# Altium footprint library 加热模块V2.4.PcbLib: 33 footprints (part 1 of 3)
Each footprint in its own frame and in the unit in brackets; x right, y up, seen from the top. Pads: shape width x height; smd on the part's side, far side on the other; paste and mask are expansions set on the pad; w line width, h text height; cw(c..) or ccw(c..) is an arc to the next point about the centre after c.
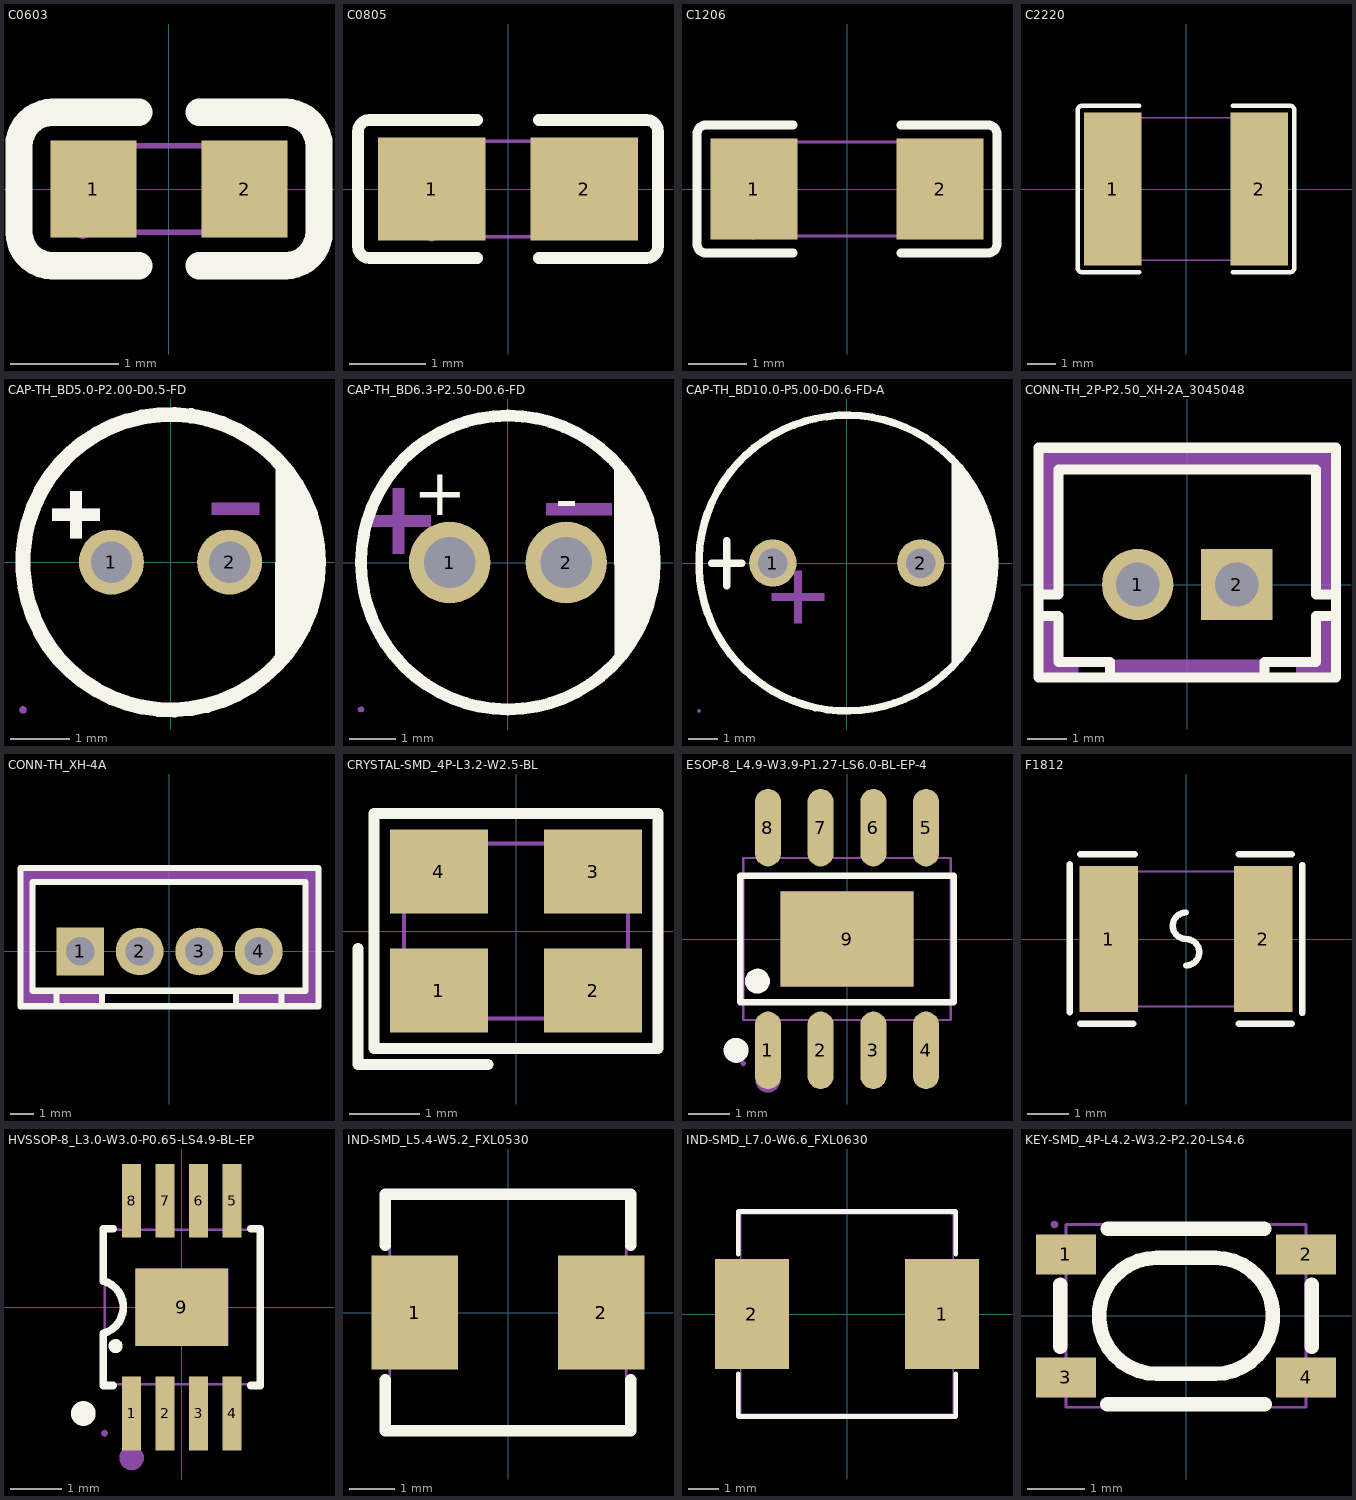
[diagram p0: the footprints below, top view; thin cyan lines are the x and y axes]

## C0603 [mm]
pads (2):
  rect 0.8x0.9 smd: 1(-0.7,0) 2(0.7,0)
Top Overlay:
  lines w0.254: -1.08,-0.71 -0.28,-0.71 ; -1.08,0.71 -0.28,0.71 ; -1.08,-0.71 cw(c-1.08,-0.4) -1.39,-0.4 -1.39,0.4 cw(c-1.08,0.4) -1.08,0.71 ; 0.28,-0.71 1.08,-0.71 ccw(c1.08,-0.4) 1.39,-0.4 1.39,0.4 ccw(c1.08,0.4) 1.08,0.71 0.28,0.71
Mechanical 15:
  region: -0.8,-0.4 -0.8,0.4 -0.5,0.4 -0.5,-0.4
  region: 0.8,-0.4 0.8,0.4 0.5,0.4 0.5,-0.4
  region: -0.865,-0.4 -0.846,-0.354 -0.8,-0.335 -0.754,-0.354 -0.735,-0.4 -0.754,-0.446 -0.8,-0.465 -0.846,-0.446
  lines w0.051: -0.8,-0.4 -0.8,0.4 0.8,0.4 0.8,-0.4 -0.8,-0.4

## C0805 [mm]
pads (2):
  rect 1.41x1.35 smd paste-100 mask+0.051: 1(-1,0) 2(1,0)
Top Overlay:
  lines w0.152: -0.401,-0.904 -1.811,-0.904 cw(c-1.811,-0.751) -1.964,-0.751 -1.964,0.751 cw(c-1.811,0.751) -1.811,0.904 -0.401,0.904 ; 0.401,-0.904 1.811,-0.904 ccw(c1.811,-0.751) 1.964,-0.751 1.964,0.751 ccw(c1.811,0.751) 1.811,0.904 0.401,0.904
Top Paste:
  region: 1.705,0.64 1.705,-0.64 1.655,-0.69 0.505,-0.69 0.455,-0.64 0.45,-0.23 0.9,-0.23 0.9,0.22 0.46,0.22 0.455,0.64 0.505,0.69 1.655,0.69
  region: -1.705,-0.64 -1.705,0.64 -1.655,0.69 -0.505,0.69 -0.455,0.64 -0.45,0.23 -0.9,0.23 -0.9,-0.22 -0.46,-0.22 -0.455,-0.64 -0.505,-0.69 -1.655,-0.69
Mechanical 15:
  region: 1,0.625 1,-0.625 0.5,-0.625 0.5,0.625
  region: -1,-0.625 -1,0.625 -0.5,0.625 -0.5,-0.625
  region: -1,-0.69 -1.046,-0.671 -1.065,-0.625 -1.046,-0.579 -1,-0.56 -0.954,-0.579 -0.935,-0.625 -0.954,-0.671
  lines w0.051: -1,-0.625 1,-0.625 1,0.625 -1,0.625 -1,-0.625

## C1206 [mm]
pads (2):
  rect 1.485x1.728 smd paste-100 mask+0.051: 1(-1.593,0) 2(1.593,0)
Top Overlay:
  lines w0.152: -0.926,-1.093 -2.411,-1.093 cw(c-2.411,-0.94) -2.564,-0.94 -2.564,0.94 cw(c-2.411,0.94) -2.411,1.093 -0.926,1.093 ; 0.926,-1.093 2.411,-1.093 ccw(c2.411,-0.94) 2.564,-0.94 2.564,0.94 ccw(c2.411,0.94) 2.411,1.093 0.926,1.093
Top Paste:
  region: -0.85,-0.764 -0.85,-0.394 -0.95,-0.294 -1.255,-0.294 -1.355,-0.194 -1.355,0.194 -1.255,0.294 -0.95,0.294 -0.85,0.394 -0.85,0.764 -0.95,0.864 -2.235,0.864 -2.335,0.764 -2.335,-0.764 -2.235,-0.864 -0.95,-0.864
  region: 0.85,-0.764 0.85,-0.394 0.95,-0.294 1.255,-0.294 1.355,-0.194 1.355,0.194 1.255,0.294 0.95,0.294 0.85,0.394 0.85,0.764 0.95,0.864 2.235,0.864 2.335,0.764 2.335,-0.764 2.235,-0.864 0.95,-0.864
Mechanical 15:
  region: 1.6,-0.8 1.6,0.8 1.1,0.8 1.1,-0.8
  region: -1.6,-0.8 -1.6,0.8 -1.1,0.8 -1.1,-0.8
  region: -1.665,-0.8 -1.646,-0.754 -1.6,-0.735 -1.554,-0.754 -1.535,-0.8 -1.554,-0.846 -1.6,-0.865 -1.646,-0.846
  lines w0.051: -1.6,-0.8 1.6,-0.8 1.6,0.8 -1.6,0.8 -1.6,-0.8

## C2220 [mm]
pads (2):
  rect 2.01x5.4 smd paste-100 mask+0.051: 1(-2.58,0) 2(2.58,0)
Top Overlay:
  lines w0.152: -1.651,-2.929 -3.661,-2.929 cw(c-3.661,-2.776) -3.814,-2.776 -3.814,2.776 cw(c-3.661,2.776) -3.661,2.929 -1.651,2.929 ; 1.651,-2.929 3.661,-2.929 ccw(c3.661,-2.776) 3.814,-2.776 3.814,2.776 ccw(c3.661,2.776) 3.661,2.929 1.651,2.929
Top Paste:
  region: -1.575,-2.6 -1.575,-1.018 -1.675,-0.918 -2.158,-0.918 -2.258,-0.818 -2.258,0.818 -2.158,0.918 -1.675,0.918 -1.575,1.018 -1.575,2.6 -1.675,2.7 -3.485,2.7 -3.585,2.6 -3.585,-2.6 -3.485,-2.7 -1.675,-2.7
  region: 1.575,-2.6 1.575,-1.018 1.675,-0.918 2.158,-0.918 2.258,-0.818 2.258,0.818 2.158,0.918 1.675,0.918 1.575,1.018 1.575,2.6 1.675,2.7 3.485,2.7 3.585,2.6 3.585,-2.6 3.485,-2.7 1.675,-2.7
Mechanical 15:
  region: 2.85,-2.5 2.85,2.5 2,2.5 2,-2.5
  region: -2.85,-2.5 -2.85,2.5 -2,2.5 -2,-2.5
  region: -2.85,-2.565 -2.896,-2.546 -2.915,-2.5 -2.896,-2.454 -2.85,-2.435 -2.804,-2.454 -2.785,-2.5 -2.804,-2.546
  lines w0.051: -2.85,-2.5 2.85,-2.5 2.85,2.5 -2.85,2.5 -2.85,-2.5

## CAP-TH_BD5.0-P2.00-D0.5-FD [mm]
pads (2):
  round 1.1 hole 0.7 paste+0 mask+0.05: 1(-1,0) 2(1,0)
Top Overlay:
  circle w0.254: c0,0 r2.5
  region: -1.7,1.2 -1.5,1.2 -1.5,0.4 -1.7,0.4
  region: -1.2,0.9 -1.2,0.7 -2,0.7 -2,0.9
  region: 1.776,1.776 2.089,1.396 2.321,0.961 2.464,0.49 2.512,0 2.464,-0.49 2.321,-0.961 2.089,-1.396 1.776,-1.776 1.768,-1.768
Mechanical 6:
  region: 1.5,1 1.5,0.8 0.7,0.8 0.7,1
  region: -1.7,1.2 -1.5,1.2 -1.5,0.4 -1.7,0.4
  region: -1.2,0.9 -1.2,0.7 -2,0.7 -2,0.9
Mechanical 15:
  region: -1,-0.255 -1.098,-0.235 -1.18,-0.18 -1.235,-0.098 -1.255,0 -1.235,0.098 -1.18,0.18 -1.098,0.235 -1,0.255 -0.902,0.235 -0.82,0.18 -0.765,0.098 -0.745,0 -0.765,-0.098 -0.82,-0.18 -0.902,-0.235
  region: 1,-0.255 0.902,-0.235 0.82,-0.18 0.765,-0.098 0.745,0 0.765,0.098 0.82,0.18 0.902,0.235 1,0.255 1.098,0.235 1.18,0.18 1.235,0.098 1.255,0 1.235,-0.098 1.18,-0.18 1.098,-0.235
  region: -2.5,-2.565 -2.546,-2.546 -2.565,-2.5 -2.546,-2.454 -2.5,-2.435 -2.454,-2.454 -2.435,-2.5 -2.454,-2.546
  lines w0.051: -2.5,0 cw(c0,0) 0,2.5 cw(c0,0) 2.5,0 cw(c0,0) 0,-2.5 cw(c0,0) -2.5,0

## CAP-TH_BD6.3-P2.50-D0.6-FD [mm]
pads (2):
  round 1.75 hole 1.1 paste+0 mask+0.05: 1(-1.25,0) 2(1.25,0)
Top Overlay:
  circle w0.254: c0,0 r3.15
  region: 2.286,-2.286 2.285,2.17 2.293,2.176 2.615,1.799 2.874,1.376 3.064,0.918 3.179,0.436 3.218,-0.059 3.209,-0.059 3.218,-0.059 3.179,-0.553 3.064,-1.035 2.874,-1.493 2.615,-1.916 2.293,-2.293
  lines w0.254: -3.15,0 ccw(c0,0) 3.15,0 ccw(c0,0) -3.15,0
  text "-" at 1.016,0.889 h1
  text "+" at -2.032,1.016 h1
Mechanical 6:
  region: 0.826,1.27 2.222,1.27 2.222,1.016 0.826,1.016
  region: -2.476,0.191 -2.476,1.587 -2.222,1.587 -2.222,0.191
  region: -3.048,1.016 -1.651,1.016 -1.651,0.762 -3.048,0.762
Mechanical 15:
  region: 0.944,0 0.967,0.117 1.034,0.216 1.133,0.283 1.25,0.306 1.367,0.283 1.466,0.216 1.533,0.117 1.556,0 1.533,-0.117 1.466,-0.216 1.367,-0.283 1.25,-0.306 1.133,-0.283 1.034,-0.216 0.967,-0.117
  region: -1.556,0 -1.533,0.117 -1.466,0.216 -1.367,0.283 -1.25,0.306 -1.133,0.283 -1.034,0.216 -0.967,0.117 -0.944,0 -0.967,-0.117 -1.034,-0.216 -1.133,-0.283 -1.25,-0.306 -1.367,-0.283 -1.466,-0.216 -1.533,-0.117
  region: -3.217,-3.151 -3.198,-3.105 -3.152,-3.086 -3.106,-3.105 -3.087,-3.151 -3.106,-3.197 -3.152,-3.216 -3.198,-3.197
  lines w0.051: -3.152,-0.001 ccw(c-0.002,-0.001) -0.002,-3.151 0.001,-3.151 ccw(c0.001,-0.005) 3.147,-0.005 3.147,0.005 ccw(c0,0.005) 0,3.152 -0.003,3.152 ccw(c-0.003,0.003) -3.152,0.003 -3.152,-0.001

## CAP-TH_BD10.0-P5.00-D0.6-FD-A [mm]
pads (2):
  round 1.6 hole 1: 1(-2.5,0) 2(2.5,0)
Top Overlay:
  circle w0.254: c0,0 r5
  region: 3.556,3.556 3.556,-3.556 4.318,-2.54 4.826,-1.016 5.08,0.508 4.826,1.524
  lines w0.254: -4.572,0 -3.556,0 ; -4.064,-0.762 -4.064,0.762
Mechanical 6:
  region: -1.778,-2.032 -1.524,-2.032 -1.524,-0.254 -1.778,-0.254
  region: -2.54,-1.016 -0.762,-1.016 -0.762,-1.27 -2.54,-1.27
Mechanical 15:
  region: 2.5,-0.306 2.383,-0.283 2.284,-0.216 2.217,-0.117 2.194,0 2.217,0.117 2.284,0.216 2.383,0.283 2.5,0.306 2.617,0.283 2.716,0.216 2.783,0.117 2.806,0 2.783,-0.117 2.716,-0.216 2.617,-0.283
  region: -2.5,-0.306 -2.617,-0.283 -2.716,-0.216 -2.783,-0.117 -2.806,0 -2.783,0.117 -2.716,0.216 -2.617,0.283 -2.5,0.306 -2.383,0.283 -2.284,0.216 -2.217,0.117 -2.194,0 -2.217,-0.117 -2.284,-0.216 -2.383,-0.283
  region: -5,-5.065 -5.046,-5.046 -5.065,-5 -5.046,-4.954 -5,-4.935 -4.954,-4.954 -4.935,-5 -4.954,-5.046
  lines w0.051: -5,0 ccw(c0,0) 5,0 ccw(c0,0) -5,0

## CONN-TH_2P-P2.50_XH-2A_3045048 [mm]
pads (2):
  round 1.8 hole 1.1 paste+0 mask+0.05: 1(-1.25,0)
  rect 1.8x1.8 hole 1.1 paste+0 mask+0.05: 2(1.25,0)
Top Overlay:
  lines w0.254: -3.75,-0.249 -3.25,-0.249 -3.25,2.9 3.25,2.9 3.25,-0.25 3.75,-0.25 ; -3.749,-0.798 -3.249,-0.798 -3.249,-1.951 -2.751,-1.951 -1.951,-1.951 -1.951,-2.349 -2.751,-2.349 ; 2.75,-2.35 1.95,-2.35 1.95,-1.951 2.75,-1.951 3.248,-1.951 3.248,-0.798 3.749,-0.798 ; -3.75,-2.35 3.75,-2.35 3.75,3.45 -3.75,3.45 -3.75,-2.35
Mechanical 6:
  region: -3.249,-0.25 -3.75,-0.25 -3.75,3.45 3.75,3.45 3.75,-0.25 3.25,-0.25 3.25,2.917 -3.249,2.917
  region: 2.75,-1.9 3.242,-1.9 3.25,-1.908 3.25,-0.75 3.751,-0.75 3.751,-2.35 3.75,-2.35 2.751,-2.35 2.75,-2.349
  region: -1.9,-2.4 -1.9,-1.9 1.901,-1.9 1.9,-2.4
  region: -2.749,-1.95 -3.241,-1.95 -3.249,-1.958 -3.249,-0.8 -3.75,-0.8 -3.75,-2.4 -2.751,-2.4 -2.749,-2.399
Mechanical 15:
  region: -1.57,0.32 -0.93,0.32 -0.93,-0.32 -1.57,-0.32
  region: 0.93,0.32 1.57,0.32 1.57,-0.32 0.93,-0.32
  region: -3.685,-2.35 -3.704,-2.396 -3.75,-2.415 -3.796,-2.396 -3.815,-2.35 -3.796,-2.304 -3.75,-2.285 -3.704,-2.304
  lines w0.051: -3.75,-2.35 3.75,-2.35 3.75,3.45 -3.75,3.45 -3.75,-2.35

## CONN-TH_XH-4A [mm]
pads (4):
  rect 2x2 hole 1.2: 1(-3.75,0)
  round 2 hole 1.2: 2(-1.25,0) 3(1.25,0) 4(3.75,0)
Top Overlay:
  lines w0.254: 6.25,-2.3 -6.25,-2.3 -6.25,3.5 6.25,3.5 6.25,-2.286 ; -5.748,-1.651 -5.748,2.921 5.715,2.921 5.715,-1.651 -5.748,-1.651 ; -4.732,-2.286 -4.732,-1.651 -2.827,-1.651 -2.827,-2.286 -4.732,-2.286 ; 2.794,-2.286 2.794,-1.651 4.699,-1.651 4.699,-2.286 2.794,-2.286
Mechanical 6:
  region: 2.85,-1.67 5.66,-1.67 5.66,2.9 -5.67,2.9 -5.69,2.88 -5.69,-1.64 -5.71,-1.66 -2.86,-1.66 -2.85,-1.67 -2.85,-2.35 -6.16,-2.35 -6.24,-2.27 -6.24,3.5 6.26,3.5 6.26,-2.31 6.28,-2.33 2.85,-2.33
Mechanical 15:
  region: -4.075,0.325 -3.425,0.325 -3.425,-0.325 -4.075,-0.325
  region: -1.575,0.325 -0.925,0.325 -0.925,-0.325 -1.575,-0.325
  region: 0.925,0.325 1.575,0.325 1.575,-0.325 0.925,-0.325
  region: 3.425,0.325 4.075,0.325 4.075,-0.325 3.425,-0.325
  region: -6.315,-2.39 -6.296,-2.344 -6.25,-2.325 -6.204,-2.344 -6.185,-2.39 -6.204,-2.436 -6.25,-2.455 -6.296,-2.436
  lines w0.051: -6.25,-2.39 -6.25,3.41 6.25,3.41 6.25,-2.39 -6.25,-2.39

## CRYSTAL-SMD_4P-L3.2-W2.5-BL [mm]
pads (4):
  rect 1.4x1.2 smd: 1(-1.1,-0.85) 2(1.1,-0.85) 3(1.1,0.85) 4(-1.1,0.85)
Top Overlay:
  lines w0.152: -2.257,-0.25 -2.257,-1.907 -0.4,-1.907 ; -2.029,-1.678 2.029,-1.678 2.029,1.679 -2.029,1.679 -2.029,-1.678
Mechanical 6:
  circle w0.254: c-1.27,-0.889 r0.127
Mechanical 15:
  region: -1.5,-0.35 -0.6,-0.35 -0.6,-1.15 -1.5,-1.15
  region: 0.6,-0.35 1.5,-0.35 1.5,-1.15 0.6,-1.15
  region: 0.6,1.15 1.5,1.15 1.5,0.35 0.6,0.35
  region: -1.5,1.15 -0.6,1.15 -0.6,0.35 -1.5,0.35
  region: -1.535,-1.25 -1.554,-1.204 -1.6,-1.185 -1.646,-1.204 -1.665,-1.25 -1.646,-1.296 -1.6,-1.315 -1.554,-1.296
  lines w0.051: -1.6,-1.25 1.6,-1.25 1.6,1.25 -1.6,1.25 -1.6,-1.25

## ESOP-8_L4.9-W3.9-P1.27-LS6.0-BL-EP-4 [mm]
pads (9):
  oval 0.63x1.865 smd: 1(-1.905,-2.682) 2(-0.635,-2.682) 3(0.635,-2.682) 4(1.905,-2.682) 5(1.905,2.682) 6(0.635,2.682) 7(-0.635,2.682) 8(-1.905,2.682)
  rect 3.2x2.3 smd paste+0 mask+0.05: 9(0,0)
Top Overlay:
  circle w0.3: c-2.672,-2.682 r0.15
  circle w0.3: c-2.159,-1.016 r0.15
  lines w0.152: -2.576,-1.521 2.576,-1.521 2.576,1.521 -2.576,1.521 -2.576,-1.521
Mechanical 6:
  circle w0.3: c-1.905,-3.4 r0.15
Mechanical 15:
  region: -1.6,1.15 1.6,1.15 1.6,-1.15 -1.6,-1.15
  region: -2.115,-3 -2.115,-2.165 -1.695,-2.165 -1.695,-3
  region: -2.115,-2.175 -2.115,-1.94 -1.695,-1.94 -1.695,-2.175
  region: -0.845,-3 -0.845,-2.165 -0.425,-2.165 -0.425,-3
  region: -0.845,-2.175 -0.845,-1.94 -0.425,-1.94 -0.425,-2.175
  region: 0.425,-3 0.425,-2.165 0.845,-2.165 0.845,-3
  region: 0.425,-2.175 0.425,-1.94 0.845,-1.94 0.845,-2.175
  region: 1.695,-3 1.695,-2.165 2.115,-2.165 2.115,-3
  region: 1.695,-2.175 1.695,-1.94 2.115,-1.94 2.115,-2.175
  region: -2.115,2.165 -2.115,3 -1.695,3 -1.695,2.165
  region: -2.115,1.94 -2.115,2.175 -1.695,2.175 -1.695,1.94
  region: -0.845,2.165 -0.845,3 -0.425,3 -0.425,2.165
  region: -0.845,1.94 -0.845,2.175 -0.425,2.175 -0.425,1.94
  region: 0.425,2.165 0.425,3 0.845,3 0.845,2.165
  region: 0.425,1.94 0.425,2.175 0.845,2.175 0.845,1.94
  region: 1.695,2.165 1.695,3 2.115,3 2.115,2.165
  region: 1.695,1.94 1.695,2.175 2.115,2.175 2.115,1.94
  region: -2.5,-3.065 -2.546,-3.046 -2.565,-3 -2.546,-2.954 -2.5,-2.935 -2.454,-2.954 -2.435,-3 -2.454,-3.046
  lines w0.051: -2.5,-1.95 2.5,-1.95 2.5,1.95 -2.5,1.95 -2.5,-1.95

## F1812 [mm]
pads (2):
  rect 1.407x3.499 smd paste-100 mask+0.051: 1(-1.853,0) 2(1.853,0)
Top Overlay:
  lines w0.152: -2.794,-1.758 -2.794,1.798 ; -2.54,-2.032 -1.27,-2.032 ; -2.54,2.032 -1.235,2.032 ; 0,-0.635 ccw(c0,-0.318) 0,0 cw(c0,0.318) 0,0.635 ; 1.27,-2.032 2.54,-2.032 ; 1.27,2.032 2.54,2.032 ; 2.794,-1.778 2.794,1.778
Top Paste:
  region: -1.15,-1.65 -1.15,-0.695 -1.25,-0.595 -1.528,-0.595 -1.628,-0.495 -1.628,0.495 -1.528,0.595 -1.25,0.595 -1.15,0.695 -1.15,1.65 -1.25,1.75 -2.457,1.75 -2.557,1.65 -2.557,-1.65 -2.457,-1.75 -1.25,-1.75
  region: 1.15,-1.65 1.15,-0.695 1.25,-0.595 1.528,-0.595 1.628,-0.495 1.628,0.495 1.528,0.595 1.25,0.595 1.15,0.695 1.15,1.65 1.25,1.75 2.457,1.75 2.557,1.65 2.557,-1.65 2.457,-1.75 1.25,-1.75
Mechanical 15:
  region: 2.275,-1.62 2.275,1.62 1.525,1.62 1.525,-1.62
  region: -2.275,-1.62 -2.275,1.62 -1.525,1.62 -1.525,-1.62
  region: -2.275,-1.555 -2.229,-1.574 -2.21,-1.62 -2.229,-1.666 -2.275,-1.685 -2.321,-1.666 -2.34,-1.62 -2.321,-1.574
  lines w0.051: -2.275,-1.62 2.275,-1.62 2.275,1.62 -2.275,1.62 -2.275,-1.62

## HVSSOP-8_L3.0-W3.0-P0.65-LS4.9-BL-EP [mm]
pads (9):
  rect 0.364x1.43 smd: 1(-0.975,-2.065) 2(-0.325,-2.065) 3(0.325,-2.065) 4(0.975,-2.065) 5(0.975,2.065) 6(0.325,2.065) 7(-0.325,2.065) 8(-0.975,2.065)
  rect 1.8x1.5 smd: 9(0,0)
Top Overlay:
  circle w0.24: c-1.913,-2.065 r0.12
  circle w0.137: c-1.286,-0.755 r0.069
  lines w0.152: -1.337,-1.524 -1.524,-1.524 -1.524,-0.508 ccw(c-1.661,0) -1.524,0.508 -1.524,1.524 -1.337,1.524 ; 1.337,-1.524 1.524,-1.524 1.524,1.524 1.337,1.524
Mechanical 6:
  circle w0.24: c-0.975,-2.926 r0.12
Mechanical 15:
  region: -0.9,-0.75 -0.9,0.75 0.9,0.75 0.9,-0.75
  region: -0.817,1.91 -0.817,1.49 -1.132,1.49 -1.133,1.91
  region: -0.817,2.45 -0.817,1.9 -1.133,1.9 -1.133,2.45
  region: -0.168,1.91 -0.168,1.49 -0.482,1.49 -0.482,1.91
  region: -0.168,2.45 -0.168,1.9 -0.482,1.9 -0.482,2.45
  region: 0.482,1.91 0.482,1.49 0.168,1.49 0.168,1.91
  region: 0.482,2.45 0.482,1.9 0.168,1.9 0.168,2.45
  region: 1.132,1.91 1.132,1.49 0.817,1.49 0.817,1.91
  region: 1.132,2.45 1.132,1.9 0.817,1.9 0.817,2.45
  region: 1.133,-1.91 1.132,-1.49 0.817,-1.49 0.817,-1.91
  region: 1.133,-2.45 1.133,-1.9 0.817,-1.9 0.817,-2.45
  region: 0.482,-1.91 0.482,-1.49 0.168,-1.49 0.168,-1.91
  region: 0.482,-2.45 0.482,-1.9 0.168,-1.9 0.168,-2.45
  region: -0.168,-1.91 -0.168,-1.49 -0.482,-1.49 -0.482,-1.91
  region: -0.168,-2.45 -0.168,-1.9 -0.482,-1.9 -0.482,-2.45
  region: -0.817,-1.91 -0.817,-1.49 -1.132,-1.49 -1.132,-1.91
  region: -0.817,-2.45 -0.817,-1.9 -1.132,-1.9 -1.132,-2.45
  region: -1.435,-2.45 -1.454,-2.404 -1.5,-2.385 -1.546,-2.404 -1.565,-2.45 -1.546,-2.496 -1.5,-2.515 -1.454,-2.496
  lines w0.051: -1.5,-1.5 1.5,-1.5 1.5,1.5 -1.5,1.5 -1.5,-1.5

## IND-SMD_L5.4-W5.2_FXL0530 [mm]
pads (2):
  rect 1.9x2.5 smd: 1(-2.05,0) 2(2.05,0)
Top Overlay:
  lines w0.254: -2.7,-1.481 -2.7,-2.6 2.7,-2.6 2.7,-1.481 ; -2.7,1.481 -2.7,2.6 2.7,2.6 2.7,1.481
Mechanical 15:
  region: 2.7,-1.1 1.5,-1.1 1.5,1.1 2.7,1.1
  region: -2.7,1.1 -1.5,1.1 -1.5,-1.1 -2.7,-1.1
  region: -2.765,-2.6 -2.746,-2.554 -2.7,-2.535 -2.654,-2.554 -2.635,-2.6 -2.654,-2.646 -2.7,-2.665 -2.746,-2.646
  lines w0.051: -2.6,-2.6 -2.6,2.6 2.6,2.6 2.6,-2.6 -2.6,-2.6

## IND-SMD_L7.0-W6.6_FXL0630 [mm]
pads (2):
  rect 2.424x3.62 smd: 1(3.128,0) 2(-3.128,0)
Top Overlay:
  lines w0.152: -3.576,-1.962 -3.576,-3.376 3.576,-3.376 3.576,-1.962 ; -3.576,1.962 -3.576,3.376 3.576,3.376 3.576,1.962
Mechanical 15:
  region: 3.5,-1.6 3.5,1.6 2,1.6 2,-1.6
  region: -3.5,-1.6 -3.5,1.6 -2,1.6 -2,-1.6
  region: 3.5,3.365 3.546,3.346 3.565,3.3 3.546,3.254 3.5,3.235 3.454,3.254 3.435,3.3 3.454,3.346
  lines w0.051: -3.5,-3.3 3.5,-3.3 3.5,3.3 -3.5,3.3 -3.5,-3.3

## KEY-SMD_4P-L4.2-W3.2-P2.20-LS4.6 [mm]
pads (4):
  rect 1.05x0.7 smd: 1(-2.1,1.075) 2(2.1,1.075) 3(-2.1,-1.075) 4(2.1,-1.075)
Top Overlay:
  lines w0.254: -2.2,-0.544 -2.2,0.544 ; -1.381,-1.55 1.381,-1.55 ; -1.366,1.524 1.366,1.524 ; 2.2,-0.544 2.2,0.544 ; -0.508,-1.016 cw(c-0.508,0) -0.508,1.016 0.508,1.016 cw(c0.508,0) 0.508,-1.016 -0.508,-1.016
Mechanical 15:
  region: -2.35,1.35 -1.65,1.35 -1.65,0.8 -2.35,0.8
  region: 1.651,1.35 2.351,1.35 2.351,0.8 1.651,0.8
  region: -2.35,-0.8 -1.65,-0.8 -1.65,-1.35 -2.35,-1.35
  region: 1.651,-0.8 2.351,-0.8 2.351,-1.35 1.651,-1.35
  region: -2.365,1.6 -2.346,1.554 -2.3,1.535 -2.254,1.554 -2.235,1.6 -2.254,1.646 -2.3,1.665 -2.346,1.646
  lines w0.051: -2.1,-1.6 -2.1,1.6 2.1,1.6 2.1,-1.6 -2.1,-1.6